# Altium footprint library TE_PKG_IM_GULLWING.PcbLib: 1 footprints
Each footprint in its own frame and in the unit in brackets; x right, y up, seen from the top. Pads: shape width x height; smd on the part's side, far side on the other; paste and mask are expansions set on the pad; w line width, h text height; cw(c..) or ccw(c..) is an arc to the next point about the centre after c.
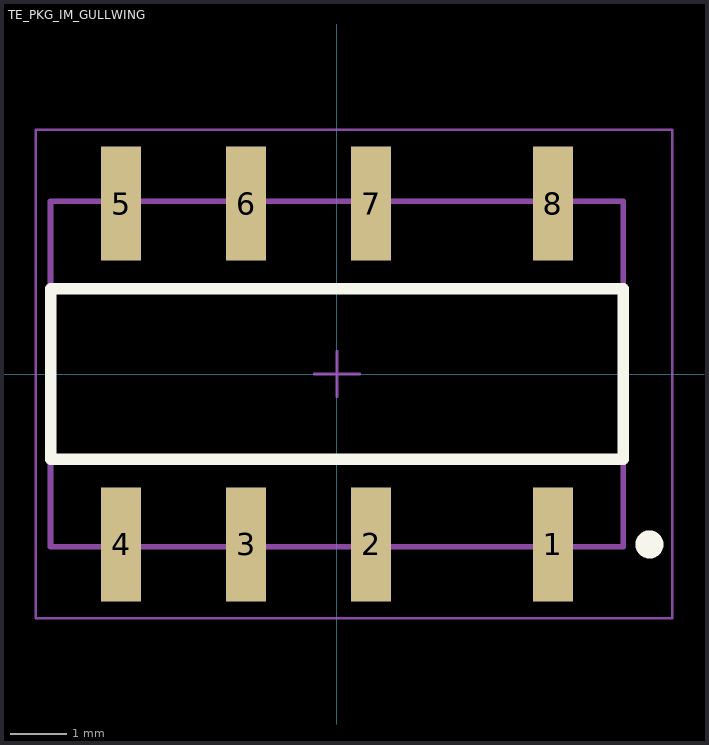
[diagram p0: the footprint, top view; thin cyan lines are the x and y axes]

## TE_PKG_IM_GULLWING [mm] "TE_PKG_IM_GULLWING"
height 5.65
pads (8):
  rect 0.7x2 smd mask+0.05: 1(3.8,-3) 2(0.6,-3) 3(-1.6,-3) 4(-3.8,-3) 5(-3.8,3) 6(-1.6,3) 7(0.6,3) 8(3.8,3)
Top Overlay:
  circle w0.25: c5.5,-3 r0.122
  lines w0.2: -5.04,-1.5 -5.04,1.5 5.04,1.5 5.04,-1.5 -5.04,-1.5
Top 3D Body:
  lines w0.1: -5.04,-3.04 -5.04,3.04 5.04,3.04 5.04,-3.04 -5.04,-3.04
Top Courtyard (Mech15):
  lines w0.05: -0.4,0 0.4,0 ; 0,-0.4 0,0.4 ; -5.3,-4.3 5.9,-4.3 5.9,4.3 -5.3,4.3 -5.3,-4.3
3D body "c-1-1462037-4-b5-3d.stp": height 5.65, standoff 0, extent -5,-3.75 5,3.75